# Altium footprint library WE-RJ45 LAN.PcbLib: 106 footprints (part 1 of 7)
Each footprint in its own frame and in the unit in brackets; x right, y up, seen from the top. Pads: shape width x height; smd on the part's side, far side on the other; paste and mask are expansions set on the pad; w line width, h text height; cw(c..) or ccw(c..) is an arc to the next point about the centre after c.
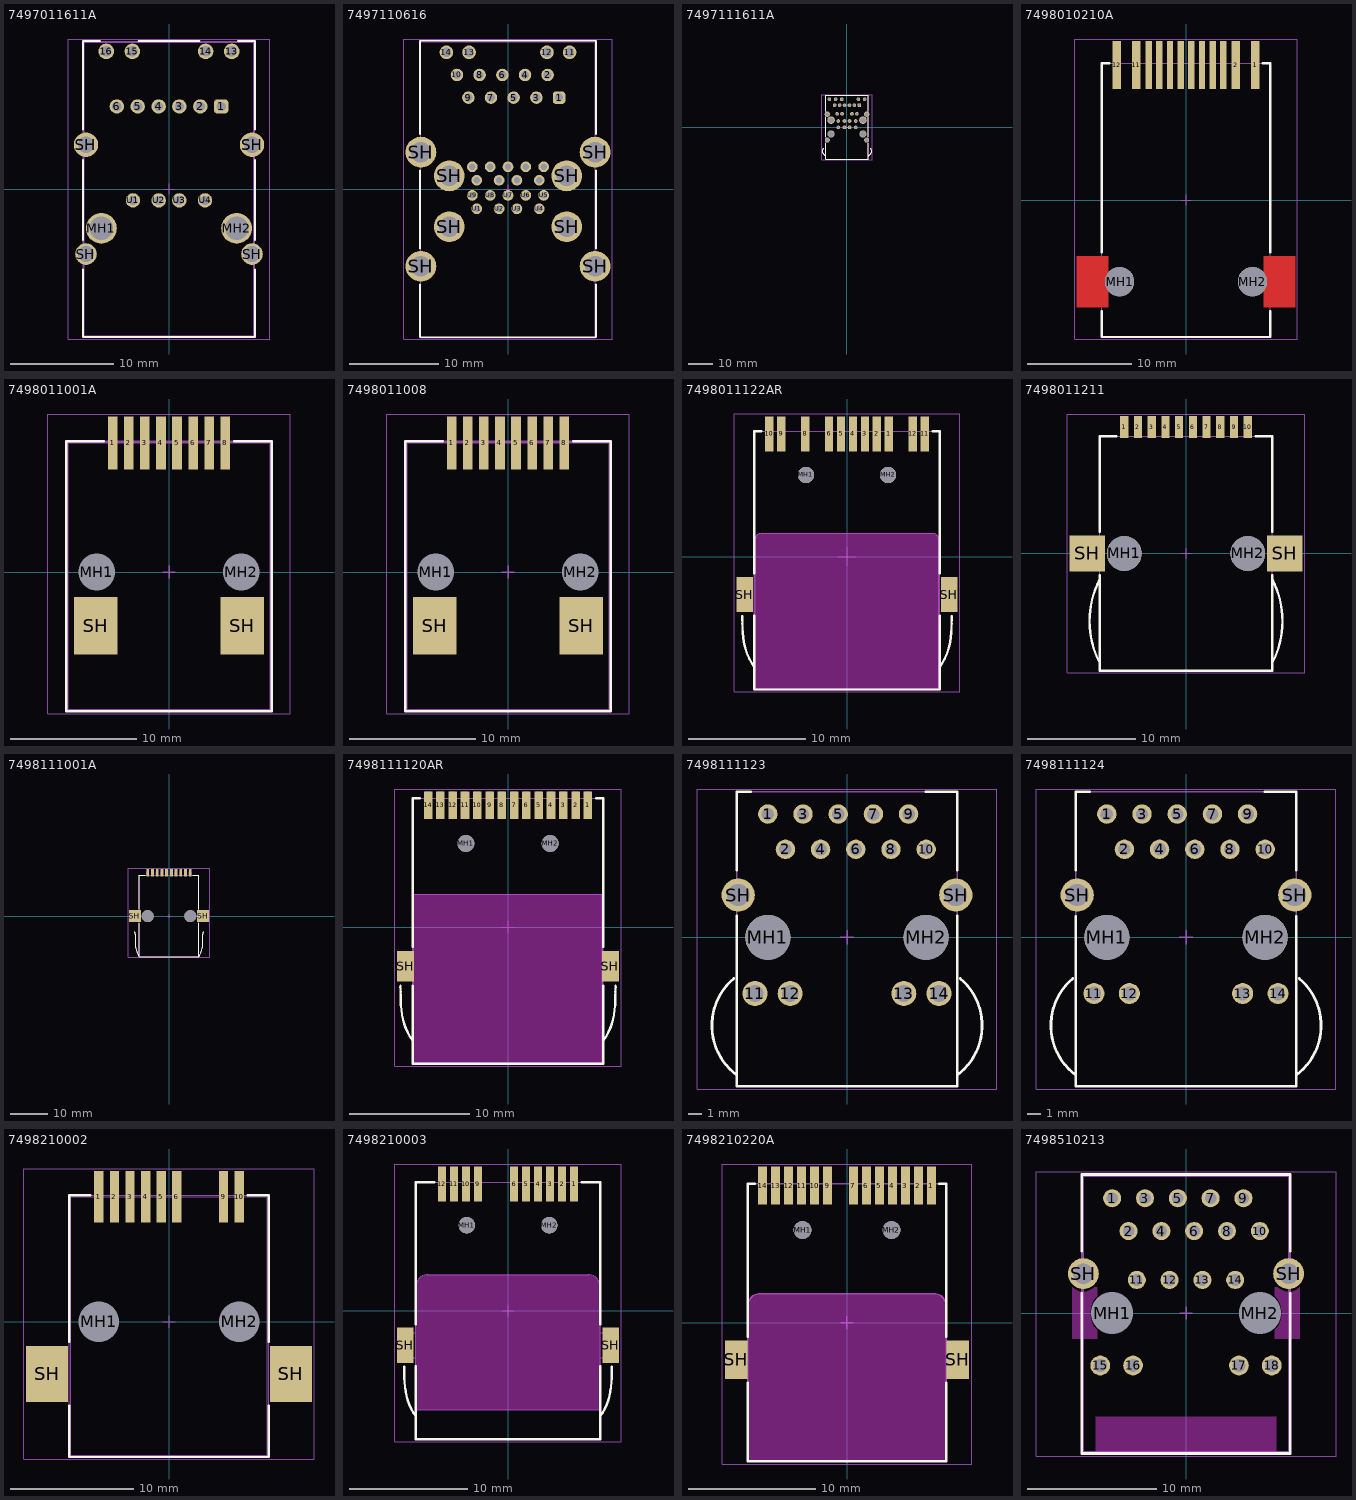
[diagram p0: the footprints below, top view; thin cyan lines are the x and y axes]

## 7497011611A [mm] "LAN Transformer, body 29x16.25mm"
height 24.42
pads (20):
  rrect50% 1.4x1.4 hole 0.9: 1(5.07,8.02)
  round 1.4 hole 0.9: 2(3.04,8.02) 3(1.01,8.02) 4(-1.01,8.02) 5(-3.04,8.02) 6(-5.07,8.02) U1(-3.5,-1.11) U2(-1,-1.11) U3(1,-1.11) U4(3.5,-1.11)
  round 1.52 hole 1.02: 13(6.095,13.37) 14(3.555,13.37) 15(-3.555,13.37) 16(-6.095,13.37)
  round 3 hole 2.3: MH1(-6.57,-3.82) MH2(6.57,-3.82)
  round 2.1 hole 1.57: SH(-8.065,-6.32) SH(8.065,-6.32)
  round 2.37 hole 1.57: SH(-8.065,4.3) SH(8.065,4.3)
Top Overlay:
  lines w0.2: -8.355,-7.82 -8.355,-14.375 8.355,-14.375 8.355,-7.82 ; -8.355,-4.95 -8.355,2.8 ; -8.355,5.8 -8.355,14.375 -6.7,14.375 ; -2.95,14.375 2.95,14.375 ; 6.7,14.375 8.355,14.375 8.355,5.8 ; 8.355,-4.95 8.355,2.8
Top Assembly:
  lines w0.1: -8.355,-14.375 -8.355,14.375 8.355,14.375 8.355,-14.375 -8.355,-14.375
Top Designator:
  text ".Designator" at -3.647,-0.357 h1
Top 3D Body:
  lines w0.1: -8.23,-14.25 -8.23,14.25 8.23,14.25 8.23,-14.25 -8.23,-14.25
Top Courtyard:
  lines w0.05: -9.793,-14.575 -9.793,14.575 9.793,14.575 9.793,-14.575 -9.793,-14.575
Top Component Center:
  lines w0.1: -0.5,0 0.5,0 ; 0,-0.5 0,0.5
3D body "7497011611A.stp": height 22.74, standoff -3.4, extent -9.593,-14.25 9.593,14.25

## 7497110616 [mm] "LAN Transformer, body 33x19.5mm"
height 32
pads (40):
  rrect50% 1.4x1.4 hole 0.89: 1(5.715,10.23)
  round 1.4 hole 0.89: 2(4.445,12.77) 3(3.175,10.23) 4(1.905,12.77) 5(0.635,10.23) 6(-0.635,12.77) 7(-1.905,10.23) 8(-3.175,12.77) 9(-4.445,10.23) 10(-5.715,12.77)
  round 1.53 hole 1.03: 11(6.9,15.31) 12(4.36,15.31) 13(-4.36,15.31) 14(-6.9,15.31)
  round 3.45 hole 2.3: SH(-9.75,-8.65) SH(-9.75,4.13) SH(-6.57,-4.22) SH(-6.57,1.46) SH(6.57,-4.22) SH(6.57,1.46) SH(9.75,-8.65) SH(9.75,4.13)
  round 1.2 hole 0.7: U1(-3.5,-2.22) U2(-1,-2.22) U3(1,-2.22) U4(3.5,-2.22) U5(4,-0.72) U6(2,-0.72) U7(0,-0.72) U8(-2,-0.72) U9(-4,-0.72) U10(-3.5,0.98) U11(-1,0.98) U12(1,0.98) U13(3.5,0.98) U14(4,2.48) U15(2,2.48) U16(0,2.48) U17(-2,2.48) U18(-4,2.48)
Top Overlay:
  lines w0.2: -9.85,-10.7 -9.85,-16.6 9.85,-16.6 9.85,-10.7 ; -9.85,-6.65 -9.85,2.1 ; -9.85,6.16 -9.85,16.6 9.85,16.6 9.85,6.16 ; 9.85,-6.65 9.85,2.1
Top Assembly:
  lines w0.1: -9.75,-16.67 -9.75,16.5 9.75,16.5 9.75,-16.67 -9.75,-16.67
Top Designator:
  text ".Designator" at -3.647,-0.357 h1
Top 3D Body:
  lines w0.1: -9.75,-16.67 -9.75,16.5 9.75,16.5 9.75,-16.67 -9.75,-16.67
Top Courtyard:
  lines w0.05: -11.675,-16.8 11.675,-16.8 11.675,16.8 -11.675,16.8 -11.675,-16.8
Top Component Center:
  lines w0.1: -0.5,0 0.5,0 ; 0,-0.5 0,0.5
3D body "7497110616.stp": height 32.15, standoff -3.05, extent -9.75,-16.65 9.75,16.5

## 7497111611A [mm] "LAN Transformer, body 26.09x17.09mm"
height 29.67
pads (31):
  rrect50% 1.5x1.5 hole 0.97: 1(5.075,9.055)
  round 1.5 hole 0.97: 2(3.045,9.055) 3(1.015,9.055) 4(-1.015,9.055) 5(-3.045,9.055) 6(-5.075,9.055) 7(4.06,5.505) 8(2.03,5.505) 9(-2.03,5.505) 10(-4.06,5.505) 11(7.225,11.485) 12(4.685,11.485) 14(-2.145,11.485) 15(-4.685,11.485) 16(-7.225,11.485) U1(-3.55,-0.085) U2(-1.05,-0.085) U3(1.05,-0.085) U4(3.55,-0.085) U5(-3.55,2.535) U6(-1.05,2.535) U7(1.05,2.535) U8(3.55,2.535)
  round 2.1 hole 1.57: SH(-8.065,-5.295) SH(8.065,-5.295)
  round 2.2 hole 1.57: SH(-8.065,5.325) SH(8.065,5.325)
  round 2.9 hole 2.31: SH(-6.565,-2.785) SH(6.565,-2.785)
  round 3.1 hole 2.31: SH(-6.565,2.905) SH(6.565,2.905)
Top Overlay:
  lines w0.2: -10.004,-9.277 ccw(c-8.751,-9.966) -10.176,-10.092 ccw(c-7.845,-9.245) -9.497,-11.095 cw(c-30.82,-33.32) -8.645,-11.945 ; -9.988,-9.229 cw(c-8.245,-9.845) -9.689,-8.69 ; -8.645,-6.595 -8.645,-13.145 8.645,-13.145 8.645,-6.595 ; -8.645,-3.995 -8.645,4.055 ; -8.645,6.595 -8.645,13.145 8.645,13.145 8.645,6.595 ; 8.645,-11.945 cw(c30.821,-33.32) 9.497,-11.095 ccw(c7.845,-9.245) 10.176,-10.092 ccw(c8.751,-9.966) 10.005,-9.277 ; 8.645,-3.995 8.645,4.055 ; 9.689,-8.69 cw(c8.245,-9.845) 9.989,-9.229
Top Assembly:
  lines w0.1: -10.004,-9.277 ccw(c-8.751,-9.966) -10.176,-10.092 ccw(c-7.845,-9.245) -9.497,-11.095 cw(c-30.82,-33.32) -8.645,-11.945 ; -9.988,-9.229 cw(c-8.245,-9.845) -9.689,-8.69 ; 8.645,-11.945 cw(c30.821,-33.32) 9.497,-11.095 ccw(c7.845,-9.245) 10.176,-10.092 ccw(c8.751,-9.966) 10.005,-9.277 ; 9.689,-8.69 cw(c8.245,-9.845) 9.989,-9.229 ; -8.645,-13.145 8.645,-13.145 8.645,13.145 -8.645,13.145 -8.645,-13.145
Top Designator:
  text ".Designator" at -3.647,-0.357 h1
Top 3D Body:
  lines w0.1: -10.004,-9.277 ccw(c-8.751,-9.966) -10.176,-10.092 ccw(c-7.845,-9.245) -9.497,-11.095 cw(c-30.82,-33.32) -8.645,-11.945 ; -9.988,-9.229 cw(c-8.245,-9.845) -9.689,-8.69 ; 8.645,-11.945 cw(c30.821,-33.32) 9.497,-11.095 ccw(c7.845,-9.245) 10.176,-10.092 ccw(c8.751,-9.966) 10.005,-9.277 ; 9.689,-8.69 cw(c8.245,-9.845) 9.989,-9.229 ; -8.645,-13.145 8.645,-13.145 8.645,13.145 -8.645,13.145 -8.645,-13.145
Top Courtyard:
  lines w0.05: -10.344,-13.345 -10.344,13.345 10.344,13.345 10.344,-13.345 -10.344,-13.345
Top Component Center:
  lines w0.1: -0.5,0 0.5,0 ; 0,-0.5 0,0.5
3D body "7497111611A.stp": height 31.43, standoff -3.83, extent -10.144,-13.045 10.144,13.045

## 7498010210A [mm] "LAN Transformer, body 16.1x25.4mm"
height 13.61
pads (16):
  rect 0.81x4.6 smd: 1(6.61,12.895) 2(4.77,12.895) 11(-4.77,12.895) 12(-6.61,12.895)
  rect 0.61x4.6 smd: 3(3.57,12.895) 4(2.55,12.895) 5(1.53,12.895) 6(0.51,12.895) 7(-0.51,12.895) 8(-1.53,12.895) 9(-2.55,12.895) 10(-3.57,12.895)
  round 2.8 hole 2.8 unplated: MH1(-6.35,-7.795) MH2(6.35,-7.795)
  round 0.025 smd: SH(-8.92,-7.795) SH(8.92,-7.795)
Top Layer:
  region: -10.42,-10.245 -10.42,-5.345 -7.42,-5.345 -7.42,-6.893 -7.42,-6.892 -7.471,-6.956 -7.561,-7.093 -7.635,-7.239 -7.691,-7.392 -7.729,-7.551 -7.748,-7.713 -7.748,-7.877 -7.729,-8.039 -7.691,-8.198 -7.635,-8.351 -7.561,-8.497 -7.471,-8.634 -7.42,-8.697 -7.42,-10.245
  region: 10.42,-10.245 10.42,-5.345 7.42,-5.345 7.42,-6.893 7.42,-6.892 7.471,-6.956 7.561,-7.093 7.635,-7.239 7.691,-7.392 7.729,-7.551 7.748,-7.713 7.748,-7.877 7.729,-8.039 7.691,-8.198 7.635,-8.351 7.561,-8.497 7.471,-8.634 7.42,-8.697 7.42,-10.245
Top Overlay:
  lines w0.2: -8.05,-10.6 -8.05,-13.075 8.05,-13.075 8.05,-10.6 ; -8.05,-5 -8.05,13.075 -7.3,13.075 ; 7.3,13.075 8.05,13.075 8.05,-5
Top Assembly:
  lines w0.1: -8.05,-13.075 -8.05,13.075 8.05,13.075 8.05,-13.075 -8.05,-13.075
Top Designator:
  text ".Designator" at -3.647,-0.357 h1
Top 3D Body:
  lines w0.1: -8.05,-13.075 8.05,-13.075 8.05,13.075 -8.05,13.075 -8.05,-13.075
Top Courtyard:
  lines w0.05: -10.62,-13.275 10.62,-13.275 10.62,15.395 -10.62,15.395 -10.62,-13.275
Top Component Center:
  lines w0.1: -0.5,0 0.5,0 ; 0,-0.5 0,0.5
3D body "7498010210A.stp": height 14.96, standoff -0.98, extent -9.45,-13.075 9.45,13.781

## 7498011001A [mm] "LAN Transformer, body 21.95x16.26mm"
height 13.6
pads (12):
  rect 0.76x4.18 smd: 1(-4.445,10.2) 2(-3.175,10.2) 3(-1.905,10.2) 4(-0.635,10.2) 5(0.635,10.2) 6(1.905,10.2) 7(3.175,10.2) 8(4.445,10.2)
  round 2.8 hole 2.9 unplated: MH1(-5.715,0) MH2(5.715,0)
  rect 3.42x4.58 smd: SH(-5.79,-4.25) SH(5.79,-4.25)
Top Overlay:
  lines w0.2: -5.15,10.325 -8.125,10.325 -8.125,-11.025 8.125,-11.025 8.125,10.325 5.15,10.325
Top Assembly:
  lines w0.1: -8.125,-11.025 -8.125,10.325 8.125,10.325 8.125,-11.025 -8.125,-11.025
Top Designator:
  text ".Designator" at -3.647,-0.357 h1
Top 3D Body:
  lines w0.1: -8,-10.9 8,-10.9 8,10.2 -8,10.2 -8,-10.9
Top Courtyard:
  lines w0.05: -9.604,-11.225 -9.604,12.49 9.604,12.49 9.604,-11.225 -9.604,-11.225
Top Component Center:
  lines w0.1: -0.5,0 0.5,0 ; 0,-0.5 0,0.5
3D body "7498011001A.stp": height 15.05, standoff -0.95, extent -9.404,-10.9 9.404,11.68

## 7498011008 [mm] "LAN Transformer, body 21.95x16.26mm"
height 13.6
pads (12):
  rect 0.76x4.18 smd: 1(-4.445,10.2) 2(-3.175,10.2) 3(-1.905,10.2) 4(-0.635,10.2) 5(0.635,10.2) 6(1.905,10.2) 7(3.175,10.2) 8(4.445,10.2)
  round 2.8 hole 2.9 unplated: MH1(-5.715,0) MH2(5.715,0)
  rect 3.42x4.58 smd: SH(-5.79,-4.25) SH(5.79,-4.25)
Top Overlay:
  lines w0.2: -5.15,10.325 -8.125,10.325 -8.125,-11.025 8.125,-11.025 8.125,10.325 5.15,10.325
Top Assembly:
  lines w0.1: -8.125,-11.025 -8.125,10.325 8.125,10.325 8.125,-11.025 -8.125,-11.025
Top Designator:
  text ".Designator" at -3.647,-0.357 h1
Top 3D Body:
  lines w0.1: -8,-10.9 -8,10.2 8,10.2 8,-10.9 -8,-10.9
Top Courtyard:
  lines w0.05: -9.604,-11.225 -9.604,12.49 9.604,12.49 9.604,-11.225 -9.604,-11.225
Top Component Center:
  lines w0.1: -0.5,0 0.5,0 ; 0,-0.5 0,0.5
3D body "7498011008.stp": height 15.05, standoff -0.95, extent -9.404,-10.9 9.404,11.68

## 7498011122AR [mm] "LAN Transformer, body 21.84x15.65mm"
height 8.89
pads (15):
  rect 0.71x3 smd: 1(3.57,10.46) 2(2.55,10.46) 3(1.53,10.46) 4(0.51,10.46) 5(-0.51,10.46) 6(-1.53,10.46) 8(-3.57,10.46) 9(-5.61,10.46) 10(-6.63,10.46) 11(6.63,10.46) 12(5.61,10.46)
  round 1.4 hole 1.4 unplated: MH1(-3.5,6.96) MH2(3.5,6.96)
  rect 1.4x3 smd: SH(-8.725,-3.24) SH(8.725,-3.24)
Top Overlay:
  lines w0.2: -8.926,-5.104 ccw(c-7.186,-5.201) -8.922,-5.351 ccw(c-7.183,-5.447) -8.919,-5.597 ccw(c-7.179,-5.694) -8.915,-5.843 ccw(c-7.175,-5.94) -8.911,-6.09 ccw(c-1.375,-5.89) -8.847,-6.888 ccw(c-3.725,-6.44) -7.933,-9.395 ; -7.925,-5.05 -7.925,-11.34 7.925,-11.34 7.925,-5.05 ; -7.925,-1.45 -7.925,10.7 -7.3,10.7 ; 7.3,10.7 7.925,10.7 7.925,-1.45 ; 7.933,-9.395 ccw(c3.725,-6.44) 8.847,-6.888 ccw(c1.375,-5.89) 8.911,-6.09 ccw(c7.175,-5.94) 8.915,-5.843 ccw(c7.179,-5.694) 8.919,-5.597 ccw(c7.183,-5.447) 8.922,-5.351 ccw(c7.186,-5.201) 8.926,-5.104
Keep-Out Layer:
  board cut-out: -7.825,-11.24 -7.825,1.47 -7.825,1.569 -7.749,1.753 -7.608,1.894 -7.424,1.97 -7.325,1.97 7.325,1.97 7.424,1.97 7.608,1.894 7.749,1.753 7.825,1.569 7.825,1.47 7.825,-11.24
Board Shape:
  lines w0.1: -7.825,-11.24 -7.825,1.47 cw(c-7.325,1.47) -7.325,1.97 7.325,1.97 cw(c7.325,1.47) 7.825,1.47 7.825,-11.24 -7.825,-11.24
  text "PCB Cutout Area" at -7,-5 h1.02
Top Assembly:
  lines w0.1: -8.926,-5.104 ccw(c-7.186,-5.201) -8.922,-5.351 ccw(c-7.183,-5.447) -8.919,-5.597 ccw(c-7.179,-5.694) -8.915,-5.843 ccw(c-7.175,-5.94) -8.911,-6.09 ccw(c-1.375,-5.89) -8.847,-6.888 ccw(c-3.725,-6.44) -7.933,-9.395 ; 7.933,-9.395 ccw(c3.725,-6.44) 8.847,-6.888 ccw(c1.375,-5.89) 8.911,-6.09 ccw(c7.175,-5.94) 8.915,-5.843 ccw(c7.179,-5.694) 8.919,-5.597 ccw(c7.183,-5.447) 8.922,-5.351 ccw(c7.186,-5.201) 8.926,-5.104 ; -7.925,-11.34 7.925,-11.34 7.925,10.7 -7.925,10.7 -7.925,-11.34
Top Designator:
  text ".Designator" at -3.647,-0.357 h1
Top 3D Body:
  lines w0.1: -8.926,-5.104 ccw(c-7.186,-5.201) -8.922,-5.351 ccw(c-7.183,-5.447) -8.919,-5.597 ccw(c-7.179,-5.694) -8.915,-5.843 ccw(c-7.175,-5.94) -8.911,-6.09 ccw(c-1.375,-5.89) -8.847,-6.888 ccw(c-3.725,-6.44) -7.933,-9.395 ; 7.933,-9.395 ccw(c3.725,-6.44) 8.847,-6.888 ccw(c1.375,-5.89) 8.911,-6.09 ccw(c7.175,-5.94) 8.915,-5.843 ccw(c7.179,-5.694) 8.919,-5.597 ccw(c7.183,-5.447) 8.922,-5.351 ccw(c7.186,-5.201) 8.926,-5.104 ; -7.925,-11.34 7.925,-11.34 7.925,10.7 -7.925,10.7 -7.925,-11.34
Top Courtyard:
  lines w0.05: -0.8,0 0.8,0 ; 0,-0.8 0,0.8 ; -9.625,-11.54 9.625,-11.54 9.625,12.16 -9.625,12.16 -9.625,-11.54
3D body "7498011122AR.stp": height 10.1, standoff -3.2, extent -9.075,-11.24 9.075,10.835

## 7498011211 [mm] "Integrated RJ45 Transformer, THT, body 15.95 x 21.65 mm"
height 13.55
pads (14):
  rect 0.76x2.03 smd: 1(-5.715,11.68) 2(-4.445,11.68) 3(-3.175,11.68) 4(-1.905,11.68) 5(-0.635,11.68) 6(0.635,11.68) 7(1.905,11.68) 8(3.175,11.68) 9(4.445,11.68) 10(5.715,11.68)
  round 3.22 hole 3.22 unplated: MH1(-5.715,0) MH2(5.715,0)
  rect 3.3x3.3 smd: SH(-9.145,0) SH(9.145,0)
Top Overlay:
  lines w0.2: -7.989,-2.388 ccw(c-0.325,-6.26) -7.975,-10.16 ; -7.975,-1.99 -7.975,-10.84 7.975,-10.84 7.975,-1.99 ; -7.975,1.99 -7.975,10.84 -6.425,10.84 ; 6.425,10.84 7.975,10.84 7.975,1.99 ; 7.975,-10.16 ccw(c0.325,-6.26) 7.989,-2.388
Top Assembly:
  lines w0.1: -7.989,-2.388 ccw(c-0.325,-6.26) -7.975,-10.16 ; -7.975,-1.21 -9.923,-1.21 -9.923,1.24 -7.975,1.24 ; -5.965,10.84 -5.965,11.912 -5.465,11.912 -5.465,10.84 ; -4.695,10.84 -4.695,11.912 -4.195,11.912 -4.195,10.84 ; -3.425,10.84 -3.425,11.912 -2.925,11.912 -2.925,10.84 ; -2.155,10.84 -2.155,11.912 -1.655,11.912 -1.655,10.84 ; -0.885,10.84 -0.885,11.912 -0.385,11.912 -0.385,10.84 ; 0.385,10.84 0.385,11.912 0.885,11.912 0.885,10.84 ; 1.655,10.84 1.655,11.912 2.155,11.912 2.155,10.84 ; 2.925,10.84 2.925,11.912 3.425,11.912 3.425,10.84 ; 4.195,10.84 4.195,11.912 4.695,11.912 4.695,10.84 ; 5.465,10.84 5.465,11.912 5.965,11.912 5.965,10.84 ; 7.975,-10.16 ccw(c0.325,-6.26) 7.989,-2.388 ; 7.975,-1.21 9.923,-1.21 9.923,1.24 7.975,1.24 ; -7.975,-10.81 7.975,-10.81 7.975,10.84 -7.975,10.84 -7.975,-10.81
Top Designator:
  text ".Designator" at -3.647,-0.357 h1
Top 3D Body:
  lines w0.1: -7.989,-2.388 ccw(c-0.325,-6.26) -7.975,-10.16 ; -7.975,-1.21 -9.923,-1.21 -9.923,1.24 -7.975,1.24 ; -5.965,10.84 -5.965,11.912 -5.465,11.912 -5.465,10.84 ; -4.695,10.84 -4.695,11.912 -4.195,11.912 -4.195,10.84 ; -3.425,10.84 -3.425,11.912 -2.925,11.912 -2.925,10.84 ; -2.155,10.84 -2.155,11.912 -1.655,11.912 -1.655,10.84 ; -0.885,10.84 -0.885,11.912 -0.385,11.912 -0.385,10.84 ; 0.385,10.84 0.385,11.912 0.885,11.912 0.885,10.84 ; 1.655,10.84 1.655,11.912 2.155,11.912 2.155,10.84 ; 2.925,10.84 2.925,11.912 3.425,11.912 3.425,10.84 ; 4.195,10.84 4.195,11.912 4.695,11.912 4.695,10.84 ; 5.465,10.84 5.465,11.912 5.965,11.912 5.965,10.84 ; 7.975,-10.16 ccw(c0.325,-6.26) 7.989,-2.388 ; 7.975,-1.21 9.923,-1.21 9.923,1.24 7.975,1.24 ; -7.975,-10.81 7.975,-10.81 7.975,10.84 -7.975,10.84 -7.975,-10.81
Top Courtyard:
  lines w0.05: -10.995,-11.04 10.995,-11.04 10.995,12.895 -10.995,12.895 -10.995,-11.04
Top Component Center:
  lines w0.1: -0.5,0 0.5,0 ; 0,-0.5 0,0.5
3D body "7498011211.stp": height 14.45, standoff -2.62, extent -9.923,-10.81 9.923,11.912

## 7498111001A [mm] "LAN Transformer, body 21.6x15.88mm"
height 13.5
pads (14):
  rect 0.76x2.03 smd: 1(5.715,11.64) 2(4.445,11.64) 3(3.175,11.64) 4(1.905,11.64) 5(0.635,11.64) 6(-0.635,11.64) 7(-1.905,11.64) 8(-3.175,11.64) 9(-4.445,11.64) 10(-5.715,11.64)
  round 3.22 hole 3.22 unplated: MH1(-5.715,-0.04) MH2(5.715,-0.04)
  rect 3.3x3.18 smd: SH(-9.145,-0.04) SH(9.145,-0.04)
Top Overlay:
  lines w0.2: -9.209,-4.203 cw(c-10.32,-4.815) -9.053,-4.872 ccw(c-5.438,-5.312) -9.08,-5.342 ccw(c15.584,-6.17) -9.009,-8.214 ccw(c-0.59,-6.695) -8.04,-10.9 ; -8.04,-1.92 -8.04,-10.9 ; -8.04,1.84 -8.04,10.9 -6.39,10.9 ; 6.41,10.9 8.04,10.9 8.04,1.84 ; 8.04,-1.92 8.04,-10.9 ; 9.209,-4.203 ccw(c10.32,-4.815) 9.053,-4.872 cw(c5.438,-5.312) 9.08,-5.342 cw(c-15.584,-6.17) 9.009,-8.214 cw(c0.59,-6.695) 8.04,-10.9 ; -8.04,-10.9 8.04,-10.9
Top Assembly:
  lines w0.1: -9.209,-4.203 cw(c-10.32,-4.815) -9.053,-4.872 ccw(c-5.438,-5.312) -9.08,-5.342 ccw(c15.584,-6.17) -9.009,-8.214 ccw(c-0.59,-6.695) -8.04,-10.9 ; -8.04,-1.24 -10.25,-1.24 -10.25,1.16 -8.04,1.16 ; -5.935,10.9 -5.935,11.86 -5.495,11.86 -5.495,10.9 ; -4.665,10.9 -4.665,11.86 -4.225,11.86 -4.225,10.9 ; -3.395,10.9 -3.395,11.86 -2.955,11.86 -2.955,10.9 ; -2.125,10.9 -2.125,11.86 -1.685,11.86 -1.685,10.9 ; -0.855,10.9 -0.855,11.86 -0.415,11.86 -0.415,10.9 ; 0.415,10.9 0.415,11.86 0.855,11.86 0.855,10.9 ; 1.685,10.9 1.685,11.86 2.125,11.86 2.125,10.9 ; 2.955,10.9 2.955,11.86 3.395,11.86 3.395,10.9 ; 4.225,10.9 4.225,11.86 4.665,11.86 4.665,10.9 ; 5.495,10.9 5.495,11.86 5.935,11.86 5.935,10.9 ; 8.04,-1.24 10.25,-1.24 10.25,1.16 8.04,1.16 ; 9.209,-4.203 ccw(c10.32,-4.815) 9.053,-4.872 cw(c5.438,-5.312) 9.08,-5.342 cw(c-15.584,-6.17) 9.009,-8.214 cw(c0.59,-6.695) 8.04,-10.9 ; -8.04,-10.9 8.04,-10.9 ; -8.04,-10.9 -8.04,10.9 8.04,10.9 8.04,-10.9
Top Designator:
  text ".Designator" at -3.647,-0.357 h1
Top 3D Body:
  lines w0.1: -9.209,-4.203 cw(c-10.32,-4.815) -9.053,-4.872 ccw(c-5.438,-5.312) -9.08,-5.342 ccw(c15.584,-6.17) -9.009,-8.214 ccw(c-0.59,-6.695) -8.04,-10.9 ; -8.04,-1.24 -10.25,-1.24 -10.25,1.16 -8.04,1.16 ; -5.935,10.9 -5.935,11.86 -5.495,11.86 -5.495,10.9 ; -4.665,10.9 -4.665,11.86 -4.225,11.86 -4.225,10.9 ; -3.395,10.9 -3.395,11.86 -2.955,11.86 -2.955,10.9 ; -2.125,10.9 -2.125,11.86 -1.685,11.86 -1.685,10.9 ; -0.855,10.9 -0.855,11.86 -0.415,11.86 -0.415,10.9 ; 0.415,10.9 0.415,11.86 0.855,11.86 0.855,10.9 ; 1.685,10.9 1.685,11.86 2.125,11.86 2.125,10.9 ; 2.955,10.9 2.955,11.86 3.395,11.86 3.395,10.9 ; 4.225,10.9 4.225,11.86 4.665,11.86 4.665,10.9 ; 5.495,10.9 5.495,11.86 5.935,11.86 5.935,10.9 ; 8.04,-1.24 10.25,-1.24 10.25,1.16 8.04,1.16 ; 9.209,-4.203 ccw(c10.32,-4.815) 9.053,-4.872 cw(c5.438,-5.312) 9.08,-5.342 cw(c-15.584,-6.17) 9.009,-8.214 cw(c0.59,-6.695) 8.04,-10.9 ; -8.04,-10.9 -8.04,10.9 8.04,10.9 8.04,-10.9 ; -8.04,-10.9 8.04,-10.9
Top Courtyard:
  lines w0.05: -10.995,-11.1 -10.995,12.855 10.995,12.855 10.995,-11.1 -10.995,-11.1
Top Component Center:
  lines w0.1: -0.5,0 0.5,0 ; 0,-0.5 0,0.5
3D body "7498111001.stp": height 13.6, standoff -2.62, extent -10.25,-10.74 10.25,11.86

## 7498111120AR [mm] "LAN Transformer, body 21.84x15.65mm"
height 8.89
pads (18):
  rect 0.71x2.29 smd: 1(6.63,10.14) 2(5.61,10.14) 3(4.59,10.14) 4(3.57,10.14) 5(2.55,10.14) 6(1.53,10.14) 7(0.51,10.14) 8(-0.51,10.14) 9(-1.53,10.14) 10(-2.55,10.14) 11(-3.57,10.14) 12(-4.59,10.14) 13(-5.61,10.14) 14(-6.63,10.14)
  round 1.4 hole 1.4 unplated: MH1(-3.5,6.96) MH2(3.5,6.96)
  rect 1.4x2.54 smd: SH(-8.51,-3.24) SH(8.51,-3.24)
Top Overlay:
  lines w0.2: -8.93,-4.858 ccw(c-7.19,-4.955) -8.926,-5.104 ccw(c-7.186,-5.201) -8.922,-5.351 ccw(c-7.183,-5.447) -8.919,-5.597 ccw(c-7.179,-5.694) -8.915,-5.843 ccw(c-7.175,-5.94) -8.911,-6.09 ccw(c-1.375,-5.89) -8.847,-6.888 ccw(c-3.725,-6.44) -7.933,-9.395 ; -7.925,-4.84 -7.925,-11.34 7.925,-11.34 7.925,-4.84 ; -7.925,-1.64 -7.925,10.7 -7.315,10.7 ; 7.315,10.7 7.925,10.7 7.925,-1.64 ; 7.933,-9.395 ccw(c3.725,-6.44) 8.847,-6.888 ccw(c1.375,-5.89) 8.911,-6.09 ccw(c7.175,-5.94) 8.915,-5.843 ccw(c7.179,-5.694) 8.919,-5.597 ccw(c7.183,-5.447) 8.922,-5.351 ccw(c7.186,-5.201) 8.926,-5.104 ccw(c7.19,-4.955) 8.93,-4.858
Keep-Out Layer:
  board cut-out: -7.81,-11.24 -7.81,2.73 7.81,2.73 7.81,-11.24
Board Shape:
  lines w0.1: -7.81,-11.24 7.81,-11.24 7.81,2.73 -7.81,2.73 -7.81,-11.24
  text "PCB Cutout Area" at -7.2,-4.13 h1.02
Top Assembly:
  lines w0.1: -8.93,-4.858 ccw(c-7.19,-4.955) -8.926,-5.104 ccw(c-7.186,-5.201) -8.922,-5.351 ccw(c-7.183,-5.447) -8.919,-5.597 ccw(c-7.179,-5.694) -8.915,-5.843 ccw(c-7.175,-5.94) -8.911,-6.09 ccw(c-1.375,-5.89) -8.847,-6.888 ccw(c-3.725,-6.44) -7.933,-9.395 ; -6.83,10.7 -6.83,11.24 -6.43,11.24 -6.43,10.7 ; -5.81,10.7 -5.81,11.24 -5.41,11.24 -5.41,10.7 ; -4.79,10.7 -4.79,11.24 -4.39,11.24 -4.39,10.7 ; -3.77,10.7 -3.77,11.24 -3.37,11.24 -3.37,10.7 ; -2.75,10.7 -2.75,11.24 -2.35,11.24 -2.35,10.7 ; -1.73,10.7 -1.73,11.24 -1.33,11.24 -1.33,10.7 ; -0.71,10.7 -0.71,11.24 -0.31,11.24 -0.31,10.7 ; 0.31,10.7 0.31,11.24 0.71,11.24 0.71,10.7 ; 1.33,10.7 1.33,11.24 1.73,11.24 1.73,10.7 ; 2.35,10.7 2.35,11.24 2.75,11.24 2.75,10.7 ; 3.37,10.7 3.37,11.24 3.77,11.24 3.77,10.7 ; 4.39,10.7 4.39,11.24 4.79,11.24 4.79,10.7 ; 5.41,10.7 5.41,11.24 5.81,11.24 5.81,10.7 ; 6.43,10.7 6.43,11.24 6.83,11.24 6.83,10.7 ; 7.933,-9.395 ccw(c3.725,-6.44) 8.847,-6.888 ccw(c1.375,-5.89) 8.911,-6.09 ccw(c7.175,-5.94) 8.915,-5.843 ccw(c7.179,-5.694) 8.919,-5.597 ccw(c7.183,-5.447) 8.922,-5.351 ccw(c7.186,-5.201) 8.926,-5.104 ccw(c7.19,-4.955) 8.93,-4.858 ; -9.075,-4.29 -9.075,-2.19 ; -9.075,-4.29 -7.925,-4.29 -9.075,-4.29 ; -9.075,-4.29 -9.075,-2.19 ; -9.075,-2.19 -7.925,-2.19 -9.075,-2.19 ; 9.075,-4.29 7.925,-4.29 9.075,-4.29 ; 9.075,-4.29 9.075,-2.19 ; 9.075,-4.29 9.075,-2.19 ; 9.075,-2.19 7.925,-2.19 9.075,-2.19 ; -7.925,-11.34 7.925,-11.34 7.925,10.7 -7.925,10.7 -7.925,-11.34
Top Designator:
  text ".Designator" at -3.647,-0.357 h1
Top 3D Body:
  lines w0.1: -8.93,-4.858 ccw(c-7.19,-4.955) -8.926,-5.104 ccw(c-7.186,-5.201) -8.922,-5.351 ccw(c-7.183,-5.447) -8.919,-5.597 ccw(c-7.179,-5.694) -8.915,-5.843 ccw(c-7.175,-5.94) -8.911,-6.09 ccw(c-1.375,-5.89) -8.847,-6.888 ccw(c-3.725,-6.44) -7.933,-9.395 ; -6.83,10.7 -6.83,11.24 -6.43,11.24 -6.43,10.7 ; -5.81,10.7 -5.81,11.24 -5.41,11.24 -5.41,10.7 ; -4.79,10.7 -4.79,11.24 -4.39,11.24 -4.39,10.7 ; -3.77,10.7 -3.77,11.24 -3.37,11.24 -3.37,10.7 ; -2.75,10.7 -2.75,11.24 -2.35,11.24 -2.35,10.7 ; -1.73,10.7 -1.73,11.24 -1.33,11.24 -1.33,10.7 ; -0.71,10.7 -0.71,11.24 -0.31,11.24 -0.31,10.7 ; 0.31,10.7 0.31,11.24 0.71,11.24 0.71,10.7 ; 1.33,10.7 1.33,11.24 1.73,11.24 1.73,10.7 ; 2.35,10.7 2.35,11.24 2.75,11.24 2.75,10.7 ; 3.37,10.7 3.37,11.24 3.77,11.24 3.77,10.7 ; 4.39,10.7 4.39,11.24 4.79,11.24 4.79,10.7 ; 5.41,10.7 5.41,11.24 5.81,11.24 5.81,10.7 ; 6.43,10.7 6.43,11.24 6.83,11.24 6.83,10.7 ; 7.933,-9.395 ccw(c3.725,-6.44) 8.847,-6.888 ccw(c1.375,-5.89) 8.911,-6.09 ccw(c7.175,-5.94) 8.915,-5.843 ccw(c7.179,-5.694) 8.919,-5.597 ccw(c7.183,-5.447) 8.922,-5.351 ccw(c7.186,-5.201) 8.926,-5.104 ccw(c7.19,-4.955) 8.93,-4.858 ; -9.075,-4.29 -7.925,-4.29 -9.075,-4.29 ; -9.075,-4.29 -9.075,-2.19 ; -9.075,-4.29 -9.075,-2.19 ; -9.075,-2.19 -7.925,-2.19 -9.075,-2.19 ; 9.075,-4.29 9.075,-2.19 ; 9.075,-4.29 9.075,-2.19 ; 9.075,-4.29 7.925,-4.29 9.075,-4.29 ; 9.075,-2.19 7.925,-2.19 9.075,-2.19 ; -7.925,-11.34 7.925,-11.34 7.925,10.7 -7.925,10.7 -7.925,-11.34
Top Courtyard:
  lines w0.05: -9.41,-11.54 9.41,-11.54 ; -9.41,-11.485 -9.41,11.485 9.41,11.485 9.41,-11.485
Top Component Center:
  lines w0.1: -0.5,0 0.5,0 ; 0,-0.5 0,0.5
3D body "7498111120AR.stp": height 10.1, standoff -3.2, extent -9.075,-11.24 9.075,11.24

## 7498111123 [mm] "Integrated RJ45 Transformer, THR, body 15.9x21.25mm"
height 13.5
pads (18):
  round 1.4 hole 0.9: 1(-5.715,8.89) 2(-4.445,6.35) 3(-3.175,8.89) 4(-1.905,6.35) 5(-0.635,8.89) 6(0.635,6.35) 7(1.905,8.89) 8(3.175,6.35) 9(4.445,8.89) 10(5.715,6.35)
  round 1.8 hole 1.2: 11(-6.64,-4.06) 12(-4.1,-4.06) 13(4.1,-4.06) 14(6.64,-4.06)
  round 3.25 hole 3.25 unplated: MH1(-5.715,0) MH2(5.715,0)
  round 2.4 hole 1.6: SH(-7.85,3.05) SH(7.85,3.05)
Top Overlay:
  lines w0.2: -8.171,-2.975 ccw(c-5.3,-6.375) -7.95,-9.95 ; -7.95,1.54 -7.95,-10.75 7.95,-10.75 7.95,1.54 ; -7.95,4.84 -7.95,10.5 -6.955,10.5 ; 5.695,10.5 7.95,10.5 7.95,4.84 ; 7.95,-9.95 ccw(c5.3,-6.375) 8.171,-2.975
Top Paste:
  rectangle: 4.895,1.8 10.595,4.6
  region: -4.895,4.6 -10.595,4.6 -10.595,1.8 -4.895,1.8
  rectangle: -6.715,7.89 -4.715,10.49
  rectangle: -4.175,7.89 -2.175,10.49
  rectangle: -1.635,7.89 0.365,10.49
  rectangle: 0.905,7.89 2.905,10.49
  rectangle: 3.445,7.89 5.445,10.49
  rectangle: -5.445,4.95 -3.445,7.55
  rectangle: -2.905,4.95 -0.905,7.55
  rectangle: -0.365,4.95 1.635,7.55
  rectangle: 2.175,4.95 4.175,7.55
  rectangle: 4.715,4.95 6.715,7.55
  rectangle: 3.095,-5.66 5.095,-2.46
  rectangle: 5.635,-5.66 7.635,-2.46
  region: -5.625,-2.46 -7.625,-2.46 -7.625,-5.66 -5.625,-5.66
  region: -3.085,-2.46 -5.085,-2.46 -5.085,-5.66 -3.085,-5.66
Top Assembly:
  lines w0.1: -8.171,-2.975 ccw(c-5.3,-6.375) -7.95,-9.95 ; 7.95,-9.95 ccw(c5.3,-6.375) 8.171,-2.975 ; -7.95,-10.75 7.95,-10.75 7.95,10.5 -7.95,10.5 -7.95,-10.75
Top Designator:
  text ".Designator" at -3.647,-0.357 h1
Top 3D Body:
  lines w0.1: -8.171,-2.975 ccw(c-5.3,-6.375) -7.95,-9.95 ; 7.95,-9.95 ccw(c5.3,-6.375) 8.171,-2.975 ; -7.95,-10.75 7.95,-10.75 7.95,10.5 -7.95,10.5 -7.95,-10.75
Top Courtyard:
  lines w0.05: -10.795,-10.95 -10.795,10.7 10.795,10.7 10.795,-10.95 -10.795,-10.95
Top Component Center:
  lines w0.1: -0.5,0 0.5,0 ; 0,-0.5 0,0.5
3D body "7498111123.stp": height 16.29, standoff -2.33, extent -9.718,-10.75 9.718,10.6

## 7498111124 [mm] "Integrated RJ45 Transformer, THR, body 15.9x21.25mm"
height 13.5
pads (18):
  round 1.4 hole 0.9: 1(-5.715,8.89) 2(-4.445,6.35) 3(-3.175,8.89) 4(-1.905,6.35) 5(-0.635,8.89) 6(0.635,6.35) 7(1.905,8.89) 8(3.175,6.35) 9(4.445,8.89) 10(5.715,6.35)
  round 1.52 hole 1.02: 11(-6.64,-4.06) 12(-4.09,-4.06) 13(4.09,-4.06) 14(6.64,-4.06)
  round 3.25 hole 3.25 unplated: MH1(-5.715,0) MH2(5.715,0)
  round 2.4 hole 1.6: SH(-7.85,3.05) SH(7.85,3.05)
Top Overlay:
  lines w0.2: -8.171,-2.975 ccw(c-5.3,-6.375) -7.95,-9.95 ; -7.95,1.5 -7.95,-10.75 7.95,-10.75 7.95,1.5 ; -7.95,4.85 -7.95,10.5 -6.95,10.5 ; 5.7,10.5 7.95,10.5 7.95,4.85 ; 7.95,-9.95 ccw(c5.3,-6.375) 8.171,-2.975
Top Paste:
  rectangle: 4.715,4.95 6.715,7.55
  rectangle: 2.175,4.95 4.175,7.55
  rectangle: -0.365,4.95 1.635,7.55
  rectangle: -2.905,4.95 -0.905,7.55
  rectangle: -5.445,4.95 -3.445,7.55
  rectangle: 3.445,7.89 5.445,10.49
  rectangle: 0.905,7.89 2.905,10.49
  rectangle: -1.635,7.89 0.365,10.49
  rectangle: -4.175,7.89 -2.175,10.49
  rectangle: -6.715,7.89 -4.715,10.49
  region: -4.895,4.6 -10.595,4.6 -10.595,1.8 -4.895,1.8
  rectangle: 4.895,1.8 10.595,4.6
  rectangle: -7.625,-5.66 -5.625,-2.46
  rectangle: -5.085,-5.66 -3.085,-2.46
  rectangle: 5.625,-5.66 7.625,-2.46
  rectangle: 3.085,-5.66 5.085,-2.46
Top Assembly:
  lines w0.1: -8.171,-2.975 ccw(c-5.3,-6.375) -7.95,-9.95 ; 7.95,-9.95 ccw(c5.3,-6.375) 8.171,-2.975 ; -7.95,-10.75 -7.95,10.5 7.95,10.5 7.95,-10.75 -7.95,-10.75
Top Designator:
  text ".Designator" at -3.647,-0.357 h1
Top 3D Body:
  lines w0.1: -8.171,-2.975 ccw(c-5.3,-6.375) -7.95,-9.95 ; 7.95,-9.95 ccw(c5.3,-6.375) 8.171,-2.975 ; -7.95,-10.75 -7.95,10.5 7.95,10.5 7.95,-10.75 -7.95,-10.75
Top Courtyard:
  lines w0.05: -10.795,-10.95 -10.795,10.7 10.795,10.7 10.795,-10.95 -10.795,-10.95
Top Component Center:
  lines w0.1: -0.5,0 0.5,0 ; 0,-0.5 0,0.5
3D body "7498111124.stp": height 16.34, standoff -2.28, extent -9.718,-10.75 9.718,10.6

## 7498210002 [mm] "LAN Transformer, body 21.25x16mm"
height 13.6
pads (12):
  rect 0.76x4.18 smd: 1(-5.715,10.2) 2(-4.445,10.2) 3(-3.175,10.2) 4(-1.905,10.2) 5(-0.635,10.2) 6(0.635,10.2) 9(4.445,10.2) 10(5.715,10.2)
  round 3.2 hole 3.3 unplated: MH1(-5.715,0) MH2(5.715,0)
  rect 3.42x4.58 smd: SH(-9.94,-4.25) SH(9.94,-4.25)
Top Overlay:
  lines w0.2: -8.125,-6.85 -8.125,-11.025 8.125,-11.025 8.125,-6.85 ; -8.125,-1.65 -8.125,10.325 -6.4,10.325 ; 6.4,10.325 8.125,10.325 8.125,-1.65
Top Assembly:
  lines w0.1: -8.125,-11.025 8.125,-11.025 8.125,10.325 -8.125,10.325 -8.125,-11.025
Top Designator:
  text ".Designator" at -3.647,-0.357 h1
Top 3D Body:
  lines w0.1: -8,-10.9 8,-10.9 8,10.2 -8,10.2 -8,-10.9
Top Courtyard:
  lines w0.05: -11.85,-11.225 11.85,-11.225 11.85,12.49 -11.85,12.49 -11.85,-11.225
Top Component Center:
  lines w0.1: -0.5,0 0.5,0 ; 0,-0.5 0,0.5
3D body "7498210002.stp": height 13.65, standoff -0.95, extent -10.5,-10.9 10.5,11.68

## 7498210003 [mm] "LAN Transformer, body 22.48x15.65mm"
height 11.3
pads (14):
  rect 0.71x3 smd: 1(5.61,10.78) 2(4.59,10.78) 3(3.57,10.78) 4(2.55,10.78) 5(1.53,10.78) 6(0.51,10.78) 9(-2.55,10.78) 10(-3.57,10.78) 11(-4.59,10.78) 12(-5.61,10.78)
  round 1.4 hole 1.4 unplated: MH1(-3.5,7.28) MH2(3.5,7.28)
  rect 1.4x3 smd: SH(-8.725,-2.92) SH(8.725,-2.92)
Top Overlay:
  lines w0.2: -8.829,-4.75 ccw(c-7.086,-4.781) -8.822,-4.931 ccw(c-7.083,-5.027) -8.819,-5.177 ccw(c-7.079,-5.274) -8.815,-5.423 ccw(c-7.075,-5.52) -8.811,-5.67 ccw(c-1.275,-5.47) -8.747,-6.468 ccw(c-3.625,-6.02) -7.833,-8.975 ; -7.825,-4.7 -7.825,-10.92 7.825,-10.92 7.825,-4.7 ; -7.825,-1.15 -7.825,10.92 -6.275,10.92 ; 6.275,10.92 7.825,10.92 7.825,-1.15 ; 7.833,-8.975 ccw(c3.625,-6.02) 8.747,-6.468 ccw(c1.275,-5.47) 8.811,-5.67 ccw(c7.075,-5.52) 8.815,-5.423 ccw(c7.079,-5.274) 8.819,-5.177 ccw(c7.083,-5.027) 8.822,-4.931 ccw(c7.086,-4.781) 8.829,-4.75
Keep-Out Layer:
  board cut-out: 6.825,3.08 6.923,3.08 7.117,3.042 7.299,2.966 7.462,2.857 7.602,2.717 7.711,2.554 7.787,2.372 7.825,2.178 7.825,2.08 7.825,-8.42 -7.825,-8.42 -7.825,2.08 -7.825,2.178 -7.787,2.372 -7.711,2.554 -7.602,2.717 -7.462,2.857 -7.299,2.966 -7.117,3.042 -6.923,3.08 -6.825,3.08
Board Shape:
  lines w0.1: -7.825,-8.42 -7.825,2.08 cw(c-6.825,2.08) -6.825,3.08 6.825,3.08 cw(c6.825,2.08) 7.825,2.08 7.825,-8.42 -7.825,-8.42
  text "PCB Cutout Area" at -7.07,-4.6 h1.02
Top Assembly:
  lines w0.1: -8.826,-4.684 ccw(c-7.086,-4.781) -8.822,-4.931 ccw(c-7.083,-5.027) -8.819,-5.177 ccw(c-7.079,-5.274) -8.815,-5.423 ccw(c-7.075,-5.52) -8.811,-5.67 ccw(c-1.275,-5.47) -8.747,-6.468 ccw(c-3.625,-6.02) -7.833,-8.975 ; -7.825,-3.97 -9.075,-3.97 -9.075,-1.87 -7.825,-1.87 ; -5.82,10.92 -5.82,11.56 -5.4,11.56 -5.4,10.92 ; -4.8,10.92 -4.8,11.56 -4.38,11.56 -4.38,10.92 ; -3.78,10.92 -3.78,11.56 -3.36,11.56 -3.36,10.92 ; -2.76,10.92 -2.76,11.56 -2.34,11.56 -2.34,10.92 ; 0.3,10.92 0.3,11.56 0.72,11.56 0.72,10.92 ; 1.32,10.92 1.32,11.56 1.74,11.56 1.74,10.92 ; 2.34,10.92 2.34,11.56 2.76,11.56 2.76,10.92 ; 3.36,10.92 3.36,11.56 3.78,11.56 3.78,10.92 ; 4.38,10.92 4.38,11.56 4.8,11.56 4.8,10.92 ; 5.4,10.92 5.4,11.56 5.82,11.56 5.82,10.92 ; 7.825,-3.97 9.075,-3.97 9.075,-1.87 7.825,-1.87 ; 7.833,-8.975 ccw(c3.625,-6.02) 8.747,-6.468 ccw(c1.275,-5.47) 8.811,-5.67 ccw(c7.075,-5.52) 8.815,-5.423 ccw(c7.079,-5.274) 8.819,-5.177 ccw(c7.083,-5.027) 8.822,-4.931 ccw(c7.086,-4.781) 8.826,-4.684 ; -7.825,-10.92 -7.825,10.92 7.825,10.92 7.825,-10.92 -7.825,-10.92
Top Designator:
  text ".Designator" at -3.647,-0.357 h1
Top 3D Body:
  lines w0.1: -8.826,-4.684 ccw(c-7.086,-4.781) -8.822,-4.931 ccw(c-7.083,-5.027) -8.819,-5.177 ccw(c-7.079,-5.274) -8.815,-5.423 ccw(c-7.075,-5.52) -8.811,-5.67 ccw(c-1.275,-5.47) -8.747,-6.468 ccw(c-3.625,-6.02) -7.833,-8.975 ; -7.825,-3.97 -9.075,-3.97 -9.075,-1.87 -7.825,-1.87 ; -5.82,10.92 -5.82,11.56 -5.4,11.56 -5.4,10.92 ; -4.8,10.92 -4.8,11.56 -4.38,11.56 -4.38,10.92 ; -3.78,10.92 -3.78,11.56 -3.36,11.56 -3.36,10.92 ; -2.76,10.92 -2.76,11.56 -2.34,11.56 -2.34,10.92 ; 0.3,10.92 0.3,11.56 0.72,11.56 0.72,10.92 ; 1.32,10.92 1.32,11.56 1.74,11.56 1.74,10.92 ; 2.34,10.92 2.34,11.56 2.76,11.56 2.76,10.92 ; 3.36,10.92 3.36,11.56 3.78,11.56 3.78,10.92 ; 4.38,10.92 4.38,11.56 4.8,11.56 4.8,10.92 ; 5.4,10.92 5.4,11.56 5.82,11.56 5.82,10.92 ; 7.825,-3.97 9.075,-3.97 9.075,-1.87 7.825,-1.87 ; 7.833,-8.975 ccw(c3.625,-6.02) 8.747,-6.468 ccw(c1.275,-5.47) 8.811,-5.67 ccw(c7.075,-5.52) 8.815,-5.423 ccw(c7.079,-5.274) 8.819,-5.177 ccw(c7.083,-5.027) 8.822,-4.931 ccw(c7.086,-4.781) 8.826,-4.684 ; -7.825,-10.92 7.825,-10.92 7.825,10.92 -7.825,10.92 -7.825,-10.92
Top Courtyard:
  lines w0.05: -9.625,-11.12 9.625,-11.12 9.625,12.48 -9.625,12.48 -9.625,-11.12
Top Component Center:
  lines w0.1: -0.5,0 0.5,0 ; 0,-0.5 0,0.5
3D body "7498210003.stp": height 10.1, standoff -3.2, extent -9.075,-10.92 9.075,11.56

## 7498210220A [mm] "LAN Transformer, body 21.84x15.65mm"
height 8.89
pads (17):
  rect 0.71x3 smd: 1(6.63,10.78) 2(5.61,10.78) 3(4.59,10.78) 4(3.57,10.78) 5(2.55,10.78) 6(1.53,10.78) 7(0.51,10.78) 9(-1.53,10.78) 10(-2.55,10.78) 11(-3.57,10.78) 12(-4.59,10.78) 13(-5.61,10.78) 14(-6.63,10.78)
  round 1.4 hole 1.4 unplated: MH1(-3.5,7.28) MH2(3.5,7.28)
  rect 1.8x3 smd: SH(-8.71,-2.92) SH(8.71,-2.92)
Top Overlay:
  lines w0.2: -7.825,-4.72 -7.825,-10.92 7.825,-10.92 7.825,-4.72 ; -7.825,-1.12 -7.825,10.92 -7.275,10.92 ; 7.275,10.92 7.825,10.92 7.825,-1.12
Keep-Out Layer:
  board cut-out: -7.81,-10.92 7.81,-10.92 7.81,1.29 7.81,1.389 7.772,1.582 7.696,1.764 7.587,1.928 7.447,2.067 7.284,2.176 7.102,2.252 6.908,2.29 6.81,2.29 -6.81,2.29 -6.908,2.29 -7.102,2.252 -7.284,2.176 -7.447,2.067 -7.587,1.928 -7.696,1.764 -7.772,1.582 -7.81,1.389 -7.81,1.29
Board Shape:
  lines w0.1: -7.81,-10.92 -7.81,1.29 cw(c-6.81,1.29) -6.81,2.29 6.81,2.29 cw(c6.81,1.29) 7.81,1.29 7.81,-10.92 -7.81,-10.92
  text "PCB Cutout Area" at -7.2,-4.48 h1.02
Top Assembly:
  lines w0.1: -7.825,-3.67 -8.775,-3.67 -8.775,-2.17 -7.825,-2.17 ; -6.79,10.92 -6.79,11.555 -6.47,11.555 -6.47,10.92 ; -5.77,10.92 -5.77,11.555 -5.45,11.555 -5.45,10.92 ; -4.75,10.92 -4.75,11.555 -4.43,11.555 -4.43,10.92 ; -3.73,10.92 -3.73,11.555 -3.41,11.555 -3.41,10.92 ; -2.71,10.92 -2.71,11.555 -2.39,11.555 -2.39,10.92 ; -1.69,10.92 -1.69,11.555 -1.37,11.555 -1.37,10.92 ; 0.35,10.92 0.35,11.555 0.67,11.555 0.67,10.92 ; 1.37,10.92 1.37,11.555 1.69,11.555 1.69,10.92 ; 2.39,10.92 2.39,11.555 2.71,11.555 2.71,10.92 ; 3.41,10.92 3.41,11.555 3.73,11.555 3.73,10.92 ; 4.43,10.92 4.43,11.555 4.75,11.555 4.75,10.92 ; 5.45,10.92 5.45,11.555 5.77,11.555 5.77,10.92 ; 6.47,10.92 6.47,11.555 6.79,11.555 6.79,10.92 ; 7.825,-3.67 8.775,-3.67 8.775,-2.17 7.825,-2.17 ; -7.825,-10.92 -7.825,10.92 7.825,10.92 7.825,-10.92 -7.825,-10.92
Top Designator:
  text ".Designator" at -3.647,-0.357 h1
Top 3D Body:
  lines w0.1: -7.825,-3.67 -8.775,-3.67 -8.775,-2.17 -7.825,-2.17 ; -6.79,10.92 -6.79,11.555 -6.47,11.555 -6.47,10.92 ; -5.77,10.92 -5.77,11.555 -5.45,11.555 -5.45,10.92 ; -4.75,10.92 -4.75,11.555 -4.43,11.555 -4.43,10.92 ; -3.73,10.92 -3.73,11.555 -3.41,11.555 -3.41,10.92 ; -2.71,10.92 -2.71,11.555 -2.39,11.555 -2.39,10.92 ; -1.69,10.92 -1.69,11.555 -1.37,11.555 -1.37,10.92 ; 0.35,10.92 0.35,11.555 0.67,11.555 0.67,10.92 ; 1.37,10.92 1.37,11.555 1.69,11.555 1.69,10.92 ; 2.39,10.92 2.39,11.555 2.71,11.555 2.71,10.92 ; 3.41,10.92 3.41,11.555 3.73,11.555 3.73,10.92 ; 4.43,10.92 4.43,11.555 4.75,11.555 4.75,10.92 ; 5.45,10.92 5.45,11.555 5.77,11.555 5.77,10.92 ; 6.47,10.92 6.47,11.555 6.79,11.555 6.79,10.92 ; 7.825,-3.67 8.775,-3.67 8.775,-2.17 7.825,-2.17 ; -7.825,-10.92 7.825,-10.92 7.825,10.92 -7.825,10.92 -7.825,-10.92
Top Courtyard:
  lines w0.05: -9.81,-11.12 9.81,-11.12 9.81,12.48 -9.81,12.48 -9.81,-11.12
Top Component Center:
  lines w0.1: -0.5,0 0.5,0 ; 0,-0.5 0,0.5
3D body "7498210220A.stp": height 8.9, standoff -2.4, extent -8.775,-10.92 8.775,11.555

## 7498510213 [mm] "Integrated RJ45 Transformer, THR"
height 13.5
pads (22):
  round 1.4 hole 0.9: 1(-5.715,8.89) 2(-4.445,6.35) 3(-3.175,8.89) 4(-1.905,6.35) 5(-0.635,8.89) 6(0.635,6.35) 7(1.905,8.89) 8(3.175,6.35) 9(4.445,8.89) 10(5.715,6.35) 11(-3.81,2.56) 12(-1.27,2.56) 13(1.27,2.56) 14(3.81,2.56)
  round 1.53 hole 1.02: 15(-6.64,-4.06) 16(-4.1,-4.06) 17(4.1,-4.06) 18(6.64,-4.06)
  round 3.15 hole 3.25 unplated: MH1(-5.715,0) MH2(5.715,0)
  round 2.4 hole 1.6: SH(-7.95,3.05) SH(7.95,3.05)
Top Layer keep-out:
  region: -7.005,-10.75 7.005,-10.75 7.005,-8.05 -7.005,-8.05
  region: -8.825,-2 -8.825,2 -8.735,1.918 -8.533,1.784 -8.309,1.691 -8.071,1.644 -7.829,1.644 -7.591,1.691 -7.367,1.784 -7.165,1.918 -7.075,2 -6.875,2 -6.875,1.35 -7.001,1.211 -7.209,0.9 -7.352,0.554 -7.425,0.187 -7.425,-0.187 -7.352,-0.554 -7.209,-0.9 -7.001,-1.211 -6.875,-1.35 -6.875,-2
  region: 8.825,-2 8.825,2 8.735,1.918 8.533,1.784 8.309,1.691 8.071,1.644 7.829,1.644 7.591,1.691 7.367,1.784 7.165,1.918 7.075,2 6.875,2 6.875,1.35 7.001,1.211 7.209,0.9 7.352,0.554 7.425,0.187 7.425,-0.187 7.352,-0.554 7.209,-0.9 7.001,-1.211 6.875,-1.35 6.875,-2
Top Overlay:
  lines w0.2: -8.075,1.525 -8.075,-10.875 8.075,-10.875 8.075,1.525 ; -8.075,4.8 -8.075,10.725 8.075,10.725 8.075,4.8
Top Paste:
  region: -5.105,-2.46 -3.105,-2.46 -3.105,-5.66 -5.105,-5.66
  region: -7.645,-2.46 -5.645,-2.46 -5.645,-5.66 -7.645,-5.66
  region: 5.105,-2.46 3.105,-2.46 3.105,-5.66 5.105,-5.66
  region: 7.645,-2.46 5.645,-2.46 5.645,-5.66 7.645,-5.66
  region: -5.715,1.8 -11.415,1.8 -11.415,4.6 -5.715,4.6
  region: 5.715,1.8 11.415,1.8 11.415,4.6 5.715,4.6
  region: -6.715,7.89 -4.715,7.89 -4.715,10.49 -6.715,10.49
  region: -4.175,7.89 -2.175,7.89 -2.175,10.49 -4.175,10.49
  region: -1.635,7.89 0.365,7.89 0.365,10.49 -1.635,10.49
  region: 0.905,7.89 2.905,7.89 2.905,10.49 0.905,10.49
  region: 3.445,7.89 5.445,7.89 5.445,10.49 3.445,10.49
  region: -5.445,4.95 -3.445,4.95 -3.445,7.55 -5.445,7.55
  region: -2.905,4.95 -0.905,4.95 -0.905,7.55 -2.905,7.55
  region: -0.365,4.95 1.635,4.95 1.635,7.55 -0.365,7.55
  region: 2.175,4.95 4.175,4.95 4.175,7.55 2.175,7.55
  region: 4.715,4.95 6.715,4.95 6.715,7.55 4.715,7.55
  region: -4.81,1.8 -2.81,1.8 -2.81,4.4 -4.81,4.4
  region: -2.27,1.8 -0.27,1.8 -0.27,4.4 -2.27,4.4
  region: 0.27,1.8 2.27,1.8 2.27,4.4 0.27,4.4
  region: 2.81,1.8 4.81,1.8 4.81,4.4 2.81,4.4
Assembly Notes:
  text "Stencil thickness: 0.2mm" at -7.347,-12.18 h1.5
Top Assembly:
  lines w0.1: -8.075,-10.875 -8.075,10.725 8.075,10.725 8.075,-10.875 -8.075,-10.875
Top Designator:
  text ".Designator" at -3.647,-0.357 h1
Top 3D Body:
  lines w0.1: -7.95,-10.75 -7.95,10.6 7.95,10.6 7.95,-10.75 -7.95,-10.75
Top Courtyard:
  lines w0.05: -11.615,-11.075 -11.615,10.925 11.615,10.925 11.615,-11.075 -11.615,-11.075
Top Component Center:
  lines w0.1: -0.5,0 0.5,0 ; 0,-0.5 0,0.5
3D body "7498510213.stp": height 14.1, standoff -2.85, extent -8.15,-11.001 8.15,10.6